# Altium schematic symbol library Regulator.SchLib: 250 symbols (part 5 of 6)
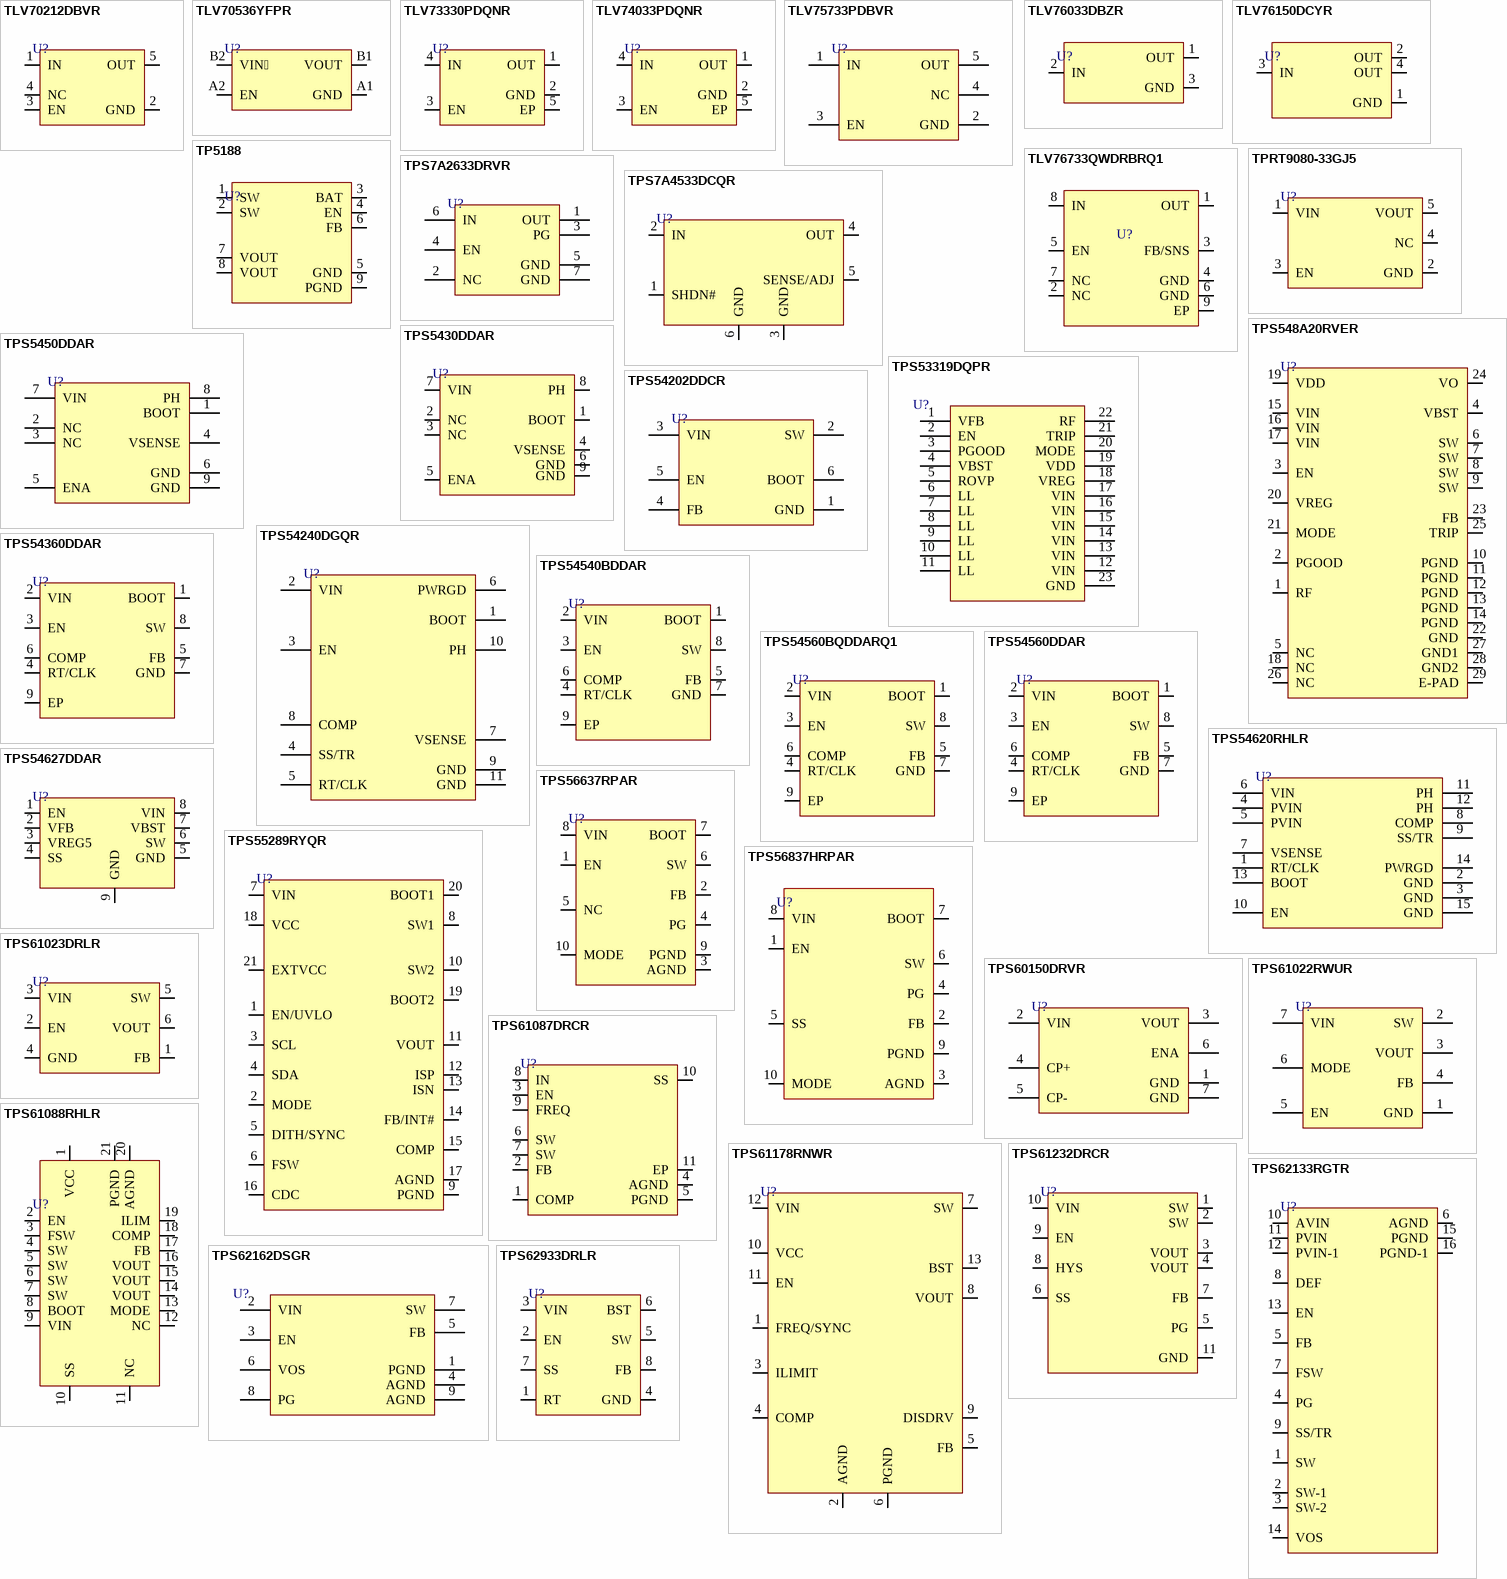
[diagram p10: symbols TLV70212DBVR to TPS62933DRLR]

## TPS7A4533DCQR
designator U?
IC REG LINEAR 3.3V 1.5A SOT223-6; Manufacturer: Texas Instruments; Manufacturer Part Number: TPS7A4533DCQR; Dropout Voltage: 300mV; Number of Outputs: 1; Max Supply Voltage: 20V; Min Input Voltage: 2.1V; Min Current Limit: 1.6A; Input Bias Current: 1mA; Polarity: Positive; Accuracy: 1%; Output Type: Fixed; Supplier: Mouser; LCSC Part Number: 595-TPS7A4533DCQR; RoHS: Yes; Item Type: IC; Stock: 854; Pricing: 1=3.2, 10=2.35, 50=2.35, 100=2.14, 1000=2, 10000=1.87 (USD); Case/Package: SOT-223-6; Pins: 6; Min Operating Temperature: -40°C; Max Operating Temperature: 125°C; Output Voltage: 3.3V; Package Quantity: 2500; Packaging: Tape and Reel; Output Current: 1.5A; Max Output current: 1.5A; Number of Regulators: 1; Quiescent Current: 1mA; Max Output Voltage: 3.3V; Min Output Voltage: 3.3V; Series: -; Radiation Hardening: No; Lead Free: Lead Free; RoHS Compliant: Yes; ComponentLink1URL: https://datasheet.ciiva.com/2046/tps7a4515-2046240.pdf?src-supplier=Digikey; ComponentLink1Description: https://datasheet.ciiva.com/2046/tps7a4515-2046240.pdf?src-supplier=Digikey; ComponentLink2URL: https://datasheet.ciiva.com/29569/tps7a4501-29569717.pdf?src-supplier=Digikey; ComponentLink2Description: https://datasheet.ciiva.com/29569/tps7a4501-29569717.pdf?src-supplier=Digikey; ComponentLink3URL: https://datasheet.ciiva.com/29569/tps7a4501-29569718.pdf?src-supplier=Digikey; ComponentLink3Description: https://datasheet.ciiva.com/29569/tps7a4501-29569718.pdf?src-supplier=Digikey; ComponentLink4URL: https://datasheet.ciiva.com/29569/tps7a4501-29569719.pdf?src-supplier=Digikey; ComponentLink4Description: https://datasheet.ciiva.com/29569/tps7a4501-29569719.pdf?src-supplier=Digikey
footprint SOT-223-6_
pins: 1 SHDN#, 2 IN, 3 GND, 4 OUT, 5 SENSE/ADJ, 6 GND

## TPS548A20RVER
designator U?
IC REG BUCK ADJ 15A 28VQFN; Manufacturer: Texas Instruments; Manufacturer Part Number: TPS548A20RVER; Package: VQFN-CLIP-28-EP(3.5x4.5); LCSC Part Number: C468255; ComponentLink1Description: LCSC; ComponentLink1URL: https://www.lcsc.com/product-detail/DC-DC-Converters_Texas-Instruments-TPS548A20RVER_C468255.html?s_z=n_TPS548A20RVER; Item Type: IC
footprint VQFN-CLIP-28-EP(3.5x4.5)*
pins: 1 RF, 2 PGOOD, 3 EN, 4 VBST, 5 NC, 6 SW, 7 SW, 8 SW, 9 SW, 10 PGND, 11 PGND, 12 PGND, 13 PGND, 14 PGND, 15 VIN, 16 VIN, 17 VIN, 18 NC, 19 VDD, 20 VREG, 21 MODE, 22 GND, 23 FB, 24 VO, 25 TRIP, 26 NC, 27 GND1, 28 GND2, 29 E-PAD

## TPS5430DDAR
designator U?
IC REG BUCK ADJ 3A 8SOPWRPAD; Manufacturer: Texas Instruments; Manufacturer Part Number: TPS5430DDAR; Number of Outputs: 1; Output Voltage: 31V; Min Input Voltage: 5.5V; Max Supply Voltage: 36V; Efficiency: 95%; Switching Frequency: 500kHz; Synchronous Rectifier: No; Quiescent Current: 3mA; Output Type: Adjustable; Min Output Voltage: 1.22V; Supplier 1: Mouser; RoHS: Yes; Category: Voltage Regulators - Switching; Stock 1: 22539; Pricing 1: 1=4.49, 10=4.03, 50=3.81, 100=3.3, 1000=2.4, 10000=2.31 (USD); Mounting Technology: Surface Mount; Case/Package: HSOP; Pins: 8; Weight: 0.00249oz; Min Operating Temperature: -40°C; Max Operating Temperature: 125°C; Packaging: Tape and Reel; Max Output current: 3A; Output Current: 3A; Package Quantity: 1; Operating Supply Voltage: 36V; Series: SWIFT™; Max Output Voltage: 31V; Length: 5mm; Width: 4mm; Height: 1.55mm; Radiation Hardening: No; Lead Free: Lead Free; RoHS Compliant: Yes; ComponentLink1URL: https://datasheet.ciiva.com/27052/1523997-27052321.pdf?src-supplier=Jameco; ComponentLink1Description: https://datasheet.ciiva.com/27052/1523997-27052321.pdf?src-supplier=Jameco; ComponentLink2URL: https://datasheet.ciiva.com/15113/getdatasheetpartid-214658-15113401.pdf?src-supplier=Verical; ComponentLink2Description: https://datasheet.ciiva.com/15113/getdatasheetpartid-214658-15113401.pdf?src-supplier=Verical; ComponentLink3URL: https://datasheet.ciiva.com/41462/001014839-da-01-en-ic-reg-buck-adj-3-tps5430ddar-soic-8-tid-41462684.pdf?src-supplier=Conrad; ComponentLink3Description: https://datasheet.ciiva.com/41462/001014839-da-01-en-ic-reg-buck-adj-3-tps5430ddar-soic-8-tid-41462684.pdf?src-supplier=Conrad; ComponentLink4URL: https://datasheet.ciiva.com/2035/tps5431-2035207.pdf?src-supplier=Digi-Key; ComponentLink4Description: https://datasheet.ciiva.com/2035/tps5431-2035207.pdf?src-supplier=Digi-Key; ComponentLink5URL: https://datasheet.ciiva.com/2035/tps5431-2035206.pdf?src-supplier=Digi-Key; ComponentLink5Description: https://datasheet.ciiva.com/2035/tps5431-2035206.pdf?src-supplier=Digi-Key; ComponentLink6URL: https://datasheet.ciiva.com/2035/tps5431-2035208.pdf?src-supplier=Digi-Key; ComponentLink6Description: https://datasheet.ciiva.com/2035/tps5431-2035208.pdf?src-supplier=Digi-Key; ComponentLink7URL: https://datasheet.ciiva.com/3220/tps5430-3220197.pdf?src-supplier=Avnet; ComponentLink7Description: https://datasheet.ciiva.com/3220/tps5430-3220197.pdf?src-supplier=Avnet; Supplier Part Number 1: 595-TPS5430DDAR; LCSC Part Number: C9864; Item Type: IC
footprint 8-SOIC-EP
pins: 1 BOOT, 2 NC, 3 NC, 4 VSENSE, 5 ENA, 6 GND, 7 VIN, 8 PH, 9 GND

## TPS5450DDAR
designator U?
IC REG BUCK ADJUSTABLE 5A 8SOPWR; Manufacturer: Texas Instruments; Manufacturer Part Number: TPS5450DDAR; Min Input Voltage: 5.5V; Number of Outputs: 1; Output Voltage: 31V; Max Supply Voltage: 36V; Switching Frequency: 500kHz; Synchronous Rectifier: No; Quiescent Current: 3mA; Min Output Voltage: 1.22V; Efficiency: 90%; Supplier 1: Mouser; RoHS: Yes; Category: Voltage Regulators - Switching; Stock 1: 10304; Pricing 1: 1=5.44, 10=4.88, 50=4.62, 100=4, 1000=2.9, 10000=2.8 (USD); Mounting Technology: Surface Mount; Case/Package: HSOP; Pins: 8; Weight: 0.00249oz; Min Operating Temperature: -40°C; Max Operating Temperature: 125°C; Packaging: Tape and Reel; Package Quantity: 1; Max Output current: 5A; Output Current: 5A; Max Output Voltage: 31V; Operating Supply Voltage: 36V; Output Type: Adjustable; Series: SWIFT™; Length: 5mm; Width: 4mm; Height: 1.55mm; Radiation Hardening: No; Lead Free: Lead Free; RoHS Compliant: Yes; ComponentLink1URL: https://datasheet.ciiva.com/15113/getdatasheetpartid-172659-15113657.pdf?src-supplier=Verical; ComponentLink1Description: https://datasheet.ciiva.com/15113/getdatasheetpartid-172659-15113657.pdf?src-supplier=Verical; ComponentLink2URL: https://datasheet.ciiva.com/2035/tps5450-2035367.pdf?src-supplier=Digi-Key; ComponentLink2Description: https://datasheet.ciiva.com/2035/tps5450-2035367.pdf?src-supplier=Digi-Key; ComponentLink3URL: https://datasheet.ciiva.com/2035/tps5450-2035366.pdf?src-supplier=Digi-Key; ComponentLink3Description: https://datasheet.ciiva.com/2035/tps5450-2035366.pdf?src-supplier=Digi-Key; ComponentLink4URL: https://datasheet.ciiva.com/2035/tps5450-2035368.pdf?src-supplier=Digi-Key; ComponentLink4Description: https://datasheet.ciiva.com/2035/tps5450-2035368.pdf?src-supplier=Digi-Key; ComponentLink5URL: https://datasheet.ciiva.com/14303/tps5450-14303689.pdf?src-supplier=Avnet; ComponentLink5Description: https://datasheet.ciiva.com/14303/tps5450-14303689.pdf?src-supplier=Avnet; ComponentLink6URL: https://datasheet.ciiva.com/3220/tps5450-3220230.pdf?src-supplier=Avnet; ComponentLink6Description: https://datasheet.ciiva.com/3220/tps5450-3220230.pdf?src-supplier=Avnet; Supplier Part Number 1: 595-TPS5450DDAR; LCSC Part Number: C114425; Item type: IC
footprint 8-SO-EP_
pins: 1 BOOT, 2 NC, 3 NC, 4 VSENSE, 5 ENA, 6 GND, 7 VIN, 8 PH, 9 GND

## TPS53319DQPR
designator U?
IC REG BUCK ADJUSTABLE 14A 22SON; Manufacturer: Texas Instruments; Manufacturer Part Number: TPS53319DQPR; Output Voltage: 5.5V; Switching Frequency: 1MHz; Min Input Voltage: 1.5V; Max Input Voltage: 22V; Number of Outputs: 1; Synchronous Rectifier: Yes; Min Output Voltage: 600mV; Quiescent Current: 320uA; Output Configuration: Positive; Efficiency: 91%; Supplier 1: Newark; RoHS: Yes; Category: Voltage Regulators - Switching; Mount: Surface Mount; Case/Package: SON; Number of Pins: 22; Contact Plating: Gold; Min Operating Temperature: -40°C; Max Operating Temperature: 85°C; Output Current: 14A; Package Quantity: 2500; Series: D-CAP™, Eco-Mode™; Packaging: Tape and Reel; Max Output Voltage: 5.5V; Output Type: Adjustable; Max Output Current: 14A; Radiation Hardening: No; Lead Free: Contains Lead; RoHS Compliant: Yes; ComponentLink1URL: https://datasheet.ciiva.com/6605/tps53318-6605682.pdf?src-supplier=Digi-Key; ComponentLink1Description: https://datasheet.ciiva.com/6605/tps53318-6605682.pdf?src-supplier=Digi-Key; ComponentLink2Description: LCSC; ComponentLink2URL: https://www.lcsc.com/product-detail/DC-DC-Converters_Texas-Instruments-TPS53319DQPR_C181971.html; LCSC Part Number: C181971; Item Type: IC
footprint 22-LSON-CLIP (6x5)
pins: 1 VFB, 2 EN, 3 PGOOD, 4 VBST, 5 ROVP, 6 LL, 7 LL, 8 LL, 9 LL, 10 LL, 11 LL, 12 VIN, 13 VIN, 14 VIN, 15 VIN, 16 VIN, 17 VIN, 18 VREG, 19 VDD, 20 MODE, 21 TRIP, 22 RF, 23 GND

## TPS54202DDCR
designator U?
IC REG BUCK ADJ 2A SOT23; Manufacturer: Texas Instruments; Manufacturer Part Number: TPS54202DDCR; Manufacturer Lifecycle Status: ACTIVE; Max Duty Cycle: 100%; Max Supply Voltage: 28V; Max Junction Temperature (Tj): 125°C; Min Input Voltage: 4.5V; Min Output Voltage: 596mV; Nominal Supply Current: 45µA; Number of Channels: 1; Output Configuration: Positive; Output Type: Adjustable; Quiescent Current: 40µA; Switching Frequency: 500kHz; Synchronous Rectifier: Yes; Supplier: DigiKey; Supplier Part Number: 296-TPS54202DDCRCT-ND; RoHS: Compliant; Item Type: IC; Stock: 4194; Pricing: 1=1.17, 10=0.844, 25=0.7636, 100=0.6746, 250=0.63224, 500=0.60672, 1000=0.5857 (USD); Case/Package: SOT-23-6; Height: 1.1mm; Lead Free: Lead Free; Length: 2.9mm; Lifecycle Status: Production; Max Operating Temperature: 125°C; Max Output Voltage: 28V; Min Operating Temperature: -40°C; Min Supply Voltage: 4.5V; Mounting Technology: Surface Mount; Number of Outputs: 1; Pins: 6; Output Current: 2A; Schedule B: 8542390000, 8542390000|8542390000|8542390000|8542390000|8542390000; Thickness: 870µm; Topology: Buck; Width: 1.6mm; ComponentLink1URL: https://sigma.octopart.com:443/180581133/technical_drawing/Texas-Instruments-TPS54202DDCR.pdf?src-supplier=Texas+Instruments; ComponentLink1Description: https://sigma.octopart.com:443/180581133/technical_drawing/Texas-Instruments-TPS54202DDCR.pdf?src-supplier=Texas+Instruments; ComponentLink2URL: https://octopart.com:443/opatz8j6/c1?t=FAFTCw9MUHEpg05pud1ULAyccV128Rvs4kpgtbIHJK4QnZYUn5DIlTqILZCRn3OGKuIK2OAwsfJUaHqp_uWt2XWRUIWZjvnlSsBH8aSBLHpCm5pUgjYkmYK7aQZ1tKHDT4GDuf94S2TW-N1iaYVMc29JfnO6Y5xBGsqSuWmXlwMR5Pf7MLFg3XCbpaNjJfeHg6VBfvWZIp62-z7iIfeN-xLXbqauIUvBeZHqQTWCwBkKVxqgCgQQwDnJZoJ9yjTomjI04wnmJO18egisqEyqoosAlQPDDAhdHAxkSRGJnBHeBom8jBmTnp4C8Wpyey22POweYbBp_aNhdPUtTJQM6gKaI5oNKWbufVAnfV7bde1UKHIaUN1cgnNmWHvEiIDYXKFykrh0&src-supplier=Texas+Instruments; ComponentLink2Description: https://octopart.com:443/opatz8j6/c1?t=FAFTCw9MUHEpg05pud1ULAyccV128Rvs4kpgtbIHJK4QnZYUn5DIlTqILZCRn3OGKuIK2OAwsfJUaHqp_uWt2XWRUIWZjvnlSsBH8aSBLHpCm5pUgjYkmYK7aQZ1tKHDT4GDuf94S2TW-N1iaYVMc29JfnO6Y5xBGsqSuWmXlwMR5Pf7MLFg3XCbpaNjJfeHg6VBfvWZIp62-z7iIfeN-xLXbqauIUvBeZHqQTWCwBkKVxqgCgQQwDnJZoJ9yjTomjI04wnmJO18egisqEyqoosAlQPDDAhdHAxkSRGJnBHeBom8jBmTnp4C8Wpyey22POweYbBp_aNhdPUtTJQM6gKaI5oNKWbufVAnfV7bde1UKHIaUN1cgnNmWHvEiIDYXKFykrh0&src-supplier=Texas+Instruments; ComponentLink3URL: https://sigma.octopart.com:443/179311906/technical_drawing/Texas-Instruments-TPS54202DDCR.pdf?src-supplier=Texas+Instruments; ComponentLink3Description: https://sigma.octopart.com:443/179311906/technical_drawing/Texas-Instruments-TPS54202DDCR.pdf?src-supplier=Texas+Instruments; ComponentLink4URL: https://sigma.octopart.com:443/159779760/technical_drawing/Texas-Instruments-TPS54202DDCR.pdf?src-supplier=Texas+Instruments; ComponentLink4Description: https://sigma.octopart.com:443/159779760/technical_drawing/Texas-Instruments-TPS54202DDCR.pdf?src-supplier=Texas+Instruments; ComponentLink5URL: https://sigma.octopart.com:443/149167535/technical_drawing/Texas-Instruments-TPS54202DDCR.pdf?src-supplier=Texas+Instruments; ComponentLink5Description: https://sigma.octopart.com:443/149167535/technical_drawing/Texas-Instruments-TPS54202DDCR.pdf?src-supplier=Texas+Instruments; ComponentLink6URL: https://sigma.octopart.com:443/49250152/technical_drawing/Texas-Instruments-TPS54202DDCR.pdf?src-supplier=Texas+Instruments; ComponentLink6Description: https://sigma.octopart.com:443/49250152/technical_drawing/Texas-Instruments-TPS54202DDCR.pdf?src-supplier=Texas+Instruments; ComponentLink7URL: https://datasheet.octopart.com:443/TPS54202DDCR-Texas-Instruments-datasheet-100480396.pdf?src-supplier=Upverter; ComponentLink7Description: https://datasheet.octopart.com:443/TPS54202DDCR-Texas-Instruments-datasheet-100480396.pdf?src-supplier=Upverter; ComponentLink8URL: https://datasheet.octopart.com:443/TPS54202DDCR-Texas-Instruments-datasheet-165804749.pdf?src-supplier=LCSC; ComponentLink8Description: https://datasheet.octopart.com:443/TPS54202DDCR-Texas-Instruments-datasheet-165804749.pdf?src-supplier=LCSC; ComponentLink9URL: https://datasheet.octopart.com:443/TPS54202DDCR-Texas-Instruments-datasheet-159118069.pdf?src-supplier=LCSC; ComponentLink9Description: https://datasheet.octopart.com:443/TPS54202DDCR-Texas-Instruments-datasheet-159118069.pdf?src-supplier=LCSC; ComponentLink10URL: https://datasheet.octopart.com:443/TPS54202DDCR-Texas-Instruments-datasheet-142296497.pdf?src-supplier=Arrow.cn; ComponentLink10Description: https://datasheet.octopart.com:443/TPS54202DDCR-Texas-Instruments-datasheet-142296497.pdf?src-supplier=Arrow.cn; ComponentLink11URL: http://sigma.octopart.com:80/conflict_mineral_statement/Texas-Instruments-company-63.pdf?src-supplier=Compliance+Statements; ComponentLink11Description: http://sigma.octopart.com:80/conflict_mineral_statement/Texas-Instruments-company-63.pdf?src-supplier=Compliance+Statements; ComponentLink12URL: http://sigma.octopart.com:80/reach_statement/Texas-Instruments-company-64.pdf?src-supplier=Compliance+Statements; ComponentLink12Description: http://sigma.octopart.com:80/reach_statement/Texas-Instruments-company-64.pdf?src-supplier=Compliance+Statements
footprint SOT-23-6 THIN
pins: 1 GND, 2 SW, 3 VIN, 4 FB, 5 EN, 6 BOOT

## TPS54240DGQR
designator U?
IC REG BCK SPLIT RAIL ADJ 10MSOP; Manufacturer: Texas Instruments; Manufacturer Part Number: TPS54240DGQR; Switching Frequency: 2.5MHz; Output Voltage: 39V; Output Current: 2.5A; Number of Outputs: 1; Max Supply Voltage: 42V; Min Input Voltage: 3.5V; Synchronous Rectifier: No; Min Output Voltage: 800mV; Quiescent Current: 138uA; Topology: Buck-Boost; Output Type: Adjustable; Supplier 1: Digi-Key; RoHS: Yes; Category: Voltage Regulators - Switching; Pricing 1: 1=3.26000, 10=2.93100, 25=2.77120, 100=2.40190, 250=2.27868, 500=2.04466, 1000=1.74300 (USD); Case/Package: HVSSOP; Pins: 10; Contact Plating: Gold; Min Operating Temperature: -40°C; Max Operating Temperature: 125°C; Packaging: Tape and Reel; Package Quantity: 1; Max Output current: 2.5A; Max Output Voltage: 39V; Series: SWIFT™, Eco-Mode™; Min Supply Voltage: 3.5V; Operating Supply Voltage: 42V; Length: 3.1mm; Width: 3.1mm; Height: 0.95mm; Radiation Hardening: No; Reach SVHC Compliant: Yes; Lead Free: Lead Free; RoHS Compliant: Yes; ComponentLink1URL: https://datasheet.ciiva.com/2026/tps54240-2026016.pdf?src-supplier=Digi-Key; ComponentLink1Description: https://datasheet.ciiva.com/2026/tps54240-2026016.pdf?src-supplier=Digi-Key; ComponentLink2URL: https://datasheet.ciiva.com/41462/001014834-da-01-en-ic-reg-buck-ad-tps54240dgqr-vssop-10-tid-41462681.pdf?src-supplier=Conrad; ComponentLink2Description: https://datasheet.ciiva.com/41462/001014834-da-01-en-ic-reg-buck-ad-tps54240dgqr-vssop-10-tid-41462681.pdf?src-supplier=Conrad; ComponentLink3URL: https://datasheet.ciiva.com/2026/tps54240-2026015.pdf?src-supplier=Digi-Key; ComponentLink3Description: https://datasheet.ciiva.com/2026/tps54240-2026015.pdf?src-supplier=Digi-Key; ComponentLink4URL: https://datasheet.ciiva.com/2026/tps54240-2026014.pdf?src-supplier=Digi-Key; ComponentLink4Description: https://datasheet.ciiva.com/2026/tps54240-2026014.pdf?src-supplier=Digi-Key; ComponentLink5URL: https://datasheet.ciiva.com/14378/slvsaa6-14378059.pdf?src-supplier=Avnet; ComponentLink5Description: https://datasheet.ciiva.com/14378/slvsaa6-14378059.pdf?src-supplier=Avnet; Supplier Part Number 1: 296-27414-1-ND; LCSC Part Number: C53213; Item Type: IC
footprint 10-HVSSOP - New (IC BATT CHG LI-ION 1CELL 10MSOP)
pins: 1 BOOT, 2 VIN, 3 EN, 4 SS/TR, 5 RT/CLK, 6 PWRGD, 7 VSENSE, 8 COMP, 9 GND, 10 PH, 11 GND

## TPS54360DDAR
designator U?
IC REG BCK SPLIT RAIL ADJ 8SOPWR; Manufacturer: Texas Instruments; Manufacturer Part Number: TPS54360DDAR; Supplier: Mouser; LCSC Part Number: C44377; RoHS: Yes; Item Type: IC; Stock: 2440; Pricing: 1=4.37, 10=3.05, 50=3.05, 100=2.76, 1000=2.47, 10000=2.31 (USD); ComponentLink1URL: https://datasheet.ciiva.com/12221/tps54360-109421-12221526.pdf?src-supplier=Mouser; ComponentLink1Description: https://datasheet.ciiva.com/12221/tps54360-109421-12221526.pdf?src-supplier=Mouser; ComponentLink2URL: https://datasheet.ciiva.com/14833/2976tps54360-14833745.pdf?src-supplier=Arrow+Electronics; ComponentLink2Description: https://datasheet.ciiva.com/14833/2976tps54360-14833745.pdf?src-supplier=Arrow+Electronics; ComponentLink3URL: https://datasheet.ciiva.com/14377/tps54360-14377976.pdf?src-supplier=Avnet; ComponentLink3Description: https://datasheet.ciiva.com/14377/tps54360-14377976.pdf?src-supplier=Avnet; ComponentLink4URL: https://datasheet.ciiva.com/41798/tps54360-41798794.pdf?src-supplier=Digikey; ComponentLink4Description: https://datasheet.ciiva.com/41798/tps54360-41798794.pdf?src-supplier=Digikey
footprint 8-SO PowerPad
pins: 1 BOOT, 2 VIN, 3 EN, 4 RT/CLK, 5 FB, 6 COMP, 7 GND, 8 SW, 9 EP

## TPS54540BDDAR
designator U?
IC REG BCK SPLIT RL ADJ 8SOPWR; Manufacturer: Texas Instruments; Manufacturer Part Number: TPS54540BDDAR; Package: SO-8; LCSC Part Number: C1850368; Item Type: IC; ComponentLink1Description: LCSC; ComponentLink1URL: https://www.lcsc.com/product-detail/DC-DC-Converters_Texas-Instruments-TPS54540BDDAR_C1850368.html
footprint 8-SO PowerPad
pins: 1 BOOT, 2 VIN, 3 EN, 4 RT/CLK, 5 FB, 6 COMP, 7 GND, 8 SW, 9 EP

## TPS54560BQDDARQ1
designator U?
IC REG BCK SPLIT RAIL ADJ 8SOPWR; Manufacturer: Texas Instruments; Manufacturer Part Number: TPS54560BQDDARQ1; Max Supply Voltage: 60V; Min Supply Voltage: 4.5V; Nominal Supply Current: 146uA; Supplier: Mouser; Supplier Part Number: 595-TPS54560BQDDARQ1; RoHS: Yes; Item Type: IC; Stock: 1171; Pricing: 1=6.41, 10=5.44, 50=5.44, 100=4.7, 1000=3.4, 10000=3.29 (USD); Length: 4.89mm; Width: 3.9mm; Height: 1.7mm; Thickness: 1.48mm; ComponentLink1URL: http://www.ti.com/lit/ds/symlink/tps54560b-q1.pdf?src-supplier=Digikey; ComponentLink1Description: http://www.ti.com/lit/ds/symlink/tps54560b-q1.pdf?src-supplier=Digikey; LCSC Part Number: C2072188
footprint 8-SO PowerPad
pins: 1 BOOT, 2 VIN, 3 EN, 4 RT/CLK, 5 FB, 6 COMP, 7 GND, 8 SW, 9 EP

## TPS54560DDAR
designator U?
IC REG BCK SPLIT RAIL ADJ 8SOPWR; Manufacturer: Texas Instruments; Manufacturer Part Number: TPS54560DDAR; Item Type: Voltage Regulators - Switching; Supplier: Mouser; Supplier Part Number: 595-TPS54560DDAR; RoHS: Yes; Stock: 12707; Pricing: 1=4.48, 10=3.93, 50=3.93, 100=3.6, 1000=2.75, 10000=2.67 (USD); ComponentLink1URL: https://datasheet.ciiva.com/15082/tps54560-15082015.pdf?src-supplier=Digikey; ComponentLink1Description: https://datasheet.ciiva.com/15082/tps54560-15082015.pdf?src-supplier=Digikey; ComponentLink2URL: https://datasheet.ciiva.com/30031/tps54560-30031578.pdf?src-supplier=Avnet; ComponentLink2Description: https://datasheet.ciiva.com/30031/tps54560-30031578.pdf?src-supplier=Avnet; ComponentLink3URL: https://datasheet.ciiva.com/29739/tps54560-29739549.pdf?src-supplier=Digikey; ComponentLink3Description: https://datasheet.ciiva.com/29739/tps54560-29739549.pdf?src-supplier=Digikey; LCSC Part Number: C31966
footprint SOIC-8-EP
pins: 1 BOOT, 2 VIN, 3 EN, 4 RT/CLK, 5 FB, 6 COMP, 7 GND, 8 SW, 9 EP

## TPS54620RHLR
designator U?
IC REG BUCK ADJUSTABLE 6A 14VQFN; Manufacturer: Texas Instruments; Manufacturer Part Number: TPS54620RHLR; Number of Outputs: 1; Output Voltage: 15V; Min Input Voltage: 1.6V; Max Input Voltage: 17V; Switching Frequency: 1.6MHz; Min Supply Voltage: 4.5V; Synchronous Rectifier: Yes; Min Output Voltage: 800mV; Quiescent Current: 600uA; Supplier 1: Digi-Key; RoHS: Yes; Category: Voltage Regulators - Switching; Pricing 1: 1=5.80000, 10=5.20700, 25=4.92280, 100=4.26630, 250=4.04752, 500=3.63182, 1000=3.61200 (USD); Mount: Surface Mount; Case/Package: QFN; Number of Pins: 14; Contact Plating: Gold; Min Operating Temperature: -40°C; Max Operating Temperature: 150°C; Max Output Current: 6A; Operating Supply Voltage: 17V; Output Current: 6A; Packaging: Tape and Reel; Package Quantity: 3000; Max Output Voltage: 15V; Output Type: Adjustable; Series: SWIFT™; Length: 3.65mm; Width: 3.65mm; Height: 0.95mm; Radiation Hardening: No; REACH SVHC: No SVHC; Lead Free: Lead Free; RoHS Compliant: Yes; ComponentLink1URL: https://datasheet.ciiva.com/2026/tps54620-2026364.pdf?src-supplier=Digi-Key; ComponentLink1Description: https://datasheet.ciiva.com/2026/tps54620-2026364.pdf?src-supplier=Digi-Key; ComponentLink2URL: https://datasheet.ciiva.com/22716/1781687-22716300.pdf?src-supplier=Element14; ComponentLink2Description: https://datasheet.ciiva.com/22716/1781687-22716300.pdf?src-supplier=Element14; ComponentLink3URL: https://datasheet.ciiva.com/2026/tps54620-2026365.pdf?src-supplier=Digi-Key; ComponentLink3Description: https://datasheet.ciiva.com/2026/tps54620-2026365.pdf?src-supplier=Digi-Key; ComponentLink4URL: https://datasheet.ciiva.com/26101/tps54620-26101515.pdf?src-supplier=Avnet+Europe; ComponentLink4Description: https://datasheet.ciiva.com/26101/tps54620-26101515.pdf?src-supplier=Avnet+Europe; ComponentLink5URL: https://datasheet.ciiva.com/3221/tps54620-3221357.pdf?src-supplier=Avnet; ComponentLink5Description: https://datasheet.ciiva.com/3221/tps54620-3221357.pdf?src-supplier=Avnet; ComponentLink6URL: https://datasheet.ciiva.com/2026/tps54620-2026366.pdf?src-supplier=Digi-Key; ComponentLink6Description: https://datasheet.ciiva.com/2026/tps54620-2026366.pdf?src-supplier=Digi-Key; Supplier Part Number 1: 296-28831-1-ND; LCSC Part Number: C263274; Item Type: IC
footprint 14-VQFN (3.5x3.5)_
pins: 1 RT/CLK, 2 GND, 3 GND, 4 PVIN, 5 PVIN, 6 VIN, 7 VSENSE, 8 COMP, 9 SS/TR, 10 EN, 11 PH, 12 PH, 13 BOOT, 14 PWRGD, 15 GND

## TPS54627DDAR
designator U?
IC REG BUCK ADJ 6A 8SOPWR; Manufacturer: Texas Instruments; Manufacturer Part Number: TPS54627DDAR; Supplier: Mouser; Supplier Part Number: 595-TPS54627DDAR; RoHS: Yes; Category: Voltage Regulators - Switching; Stock: 1189; Pricing: 1=4.39, 10=3.73, 50=3.73, 100=3.23, 1000=2.32, 10000=2.19 (USD); ComponentLink1URL: https://datasheet.ciiva.com/24017/slvsbw6a-316903-24017122.pdf?src-supplier=Mouser; ComponentLink1Description: https://datasheet.ciiva.com/24017/slvsbw6a-316903-24017122.pdf?src-supplier=Mouser; ComponentLink2URL: https://datasheet.ciiva.com/18551/tps54627-18551188.pdf?src-supplier=Digi-Key; ComponentLink2Description: https://datasheet.ciiva.com/18551/tps54627-18551188.pdf?src-supplier=Digi-Key; ComponentLink3URL: https://datasheet.ciiva.com/29885/tps54627-29885831.pdf?src-supplier=Avnet; ComponentLink3Description: https://datasheet.ciiva.com/29885/tps54627-29885831.pdf?src-supplier=Avnet; LCSC Part Number: C398919; Item Type: IC
footprint 8-SO-EP_
pins: 1 EN, 2 VFB, 3 VREG5, 4 SS, 5 GND, 6 SW, 7 VBST, 8 VIN, 9 GND

## TPS55289RYQR
designator U?
IC REG BUCK BST ADJ 6.35A 21VQFN; Manufacturer: Texas Instruments; Manufacturer Part Number: TPS55289RYQR; Topology: 6153TopologyType; Supplier: Mouser; LCSC Part Number: C5942077; RoHS: No; Item Type: IC; Stock: 13087; Pricing: 1=6.45, 10=4.74, 50=4.74, 100=4.32, 1000=4.03, 10000=4.03 (USD); ComponentLink1Description: LCSC; ComponentLink1URL: https://www.lcsc.com/product-detail/DC-DC-Converters_Texas-Instruments-TPS55289RYQR_C5942077.html?s_z=n_TPS55289RYQR
footprint VQFN-HR-21(3x5)
pins: 1 EN/UVLO, 2 MODE, 3 SCL, 4 SDA, 5 DITH/SYNC, 6 FSW, 7 VIN, 8 SW1, 9 PGND, 10 SW2, 11 VOUT, 12 ISP, 13 ISN, 14 FB/INT#, 15 COMP, 16 CDC, 17 AGND, 18 VCC, 19 BOOT2, 20 BOOT1, 21 EXTVCC

## TPS56637RPAR
designator U?
IC REG BUCK ADJ 6A 10VQFN; Manufacturer: Texas Instruments; Manufacturer Part Number: TPS56637RPAR; Output Type: Adjustable; Output Configuration: Positive; Number of Outputs: 1; Min Input Voltage: 4.5V; Max Supply Voltage: 28V; Min Output Voltage: 600mV; Max Output Voltage: 13V; Switching Frequency: 500kHz; Synchronous Rectifier: Yes; Supplier: Digikey; Supplier Part Number: 296-TPS56637RPARCT-ND; RoHS: Yes; Category: Voltage Regulators - Switching; Stock: 17824; Pricing: 1=3.71, 10=3.332, 25=3.1496, 100=2.7297, 250=2.58976, 500=2.32376, 1000=1.9598 (USD); Mounting Technology: Surface Mount; Case/Package: VQFN; Pins: 10; Min Operating Temperature: -40°C; Max Operating Temperature: 150°C; Series: -; Output Current: 6A; ComponentLink1URL: http://www.ti.com/general/docs/suppproductinfo.tsp?distId=10&amp;gotoUrl=http%3A%2F%2Fwww.ti.com%2Flit%2Fgpn%2Ftps56637&src-supplier=Digikey; ComponentLink1Description: http://www.ti.com/general/docs/suppproductinfo.tsp?distId=10&amp;gotoUrl=http%3A%2F%2Fwww.ti.com%2Flit%2Fgpn%2Ftps56637&src-supplier=Digikey; LCSC Part Number: C841386; Item Type: IC
footprint 10-VQFN-HR (3x3)
pins: 1 EN, 2 FB, 3 AGND, 4 PG, 5 NC, 6 SW, 7 BOOT, 8 VIN, 9 PGND, 10 MODE

## TPS56837HRPAR
designator U?
4.5V TO 28V INPUT, 8A SYNCHRONOU; Manufacturer: Texas Instruments; Manufacturer Part Number: TPS56837HRPAR; Item Type: IC; Supplier: Mouser; Supplier Part Number: 595-TPS56837HRPAR; RoHS: No; Stock: 4990; Pricing: 1=2.74, 10=2.46, 50=2.46, 100=1.97, 1000=1.34, 10000=1.2 (USD); Pins: 10; Length: 3mm; Width: 3mm; Height: 1mm; Thickness: 900um
footprint 10-VQFN-HR (3x3)
pins: 1 EN, 2 FB, 3 AGND, 4 PG, 5 SS, 6 SW, 7 BOOT, 8 VIN, 9 PGND, 10 MODE

## TPS60150DRVR
designator U?
IC REG CHARGE PUMP 5V 140MA 6SON; Manufacturer: Texas Instruments; Manufacturer Part Number: TPS60150DRVR; Number of Outputs: 1; Max Input Voltage: 5.5V; Min Input Voltage: 2.7V; Switching Frequency: 1.5MHz; Synchronous Rectifier: No; Min Output Voltage: 4.8V; Quiescent Current: 4.7mA; Max Output Voltage: 5.2V; Output Type: Fixed; Nominal Supply Current: 90uA; Topology: Boost; Supplier 1: Digi-Key; RoHS: Yes; Category: Voltage Regulators - Switching; Pricing 1: 1=1.69000, 10=1.51400, 25=1.42840, 100=1.21700, 250=1.14268, 500=0.99984, 1000=0.94325 (USD); Case/Package: SON; Number of Pins: 6; Contact Plating: Gold; Min Operating Temperature: -40°C; Max Operating Temperature: 85°C; Packaging: Tape and Reel; Output Voltage: 5V; Output Current: 140mA; Package Quantity: 1; Max Output Current: 140mA; Series: -; Max Supply Voltage: 5.5V; Min Supply Voltage: 2.7V; Nominal Output Voltage: 5V; Supply Current: 90uA; Radiation Hardening: No; REACH SVHC: No SVHC; Lead Free: Lead Free; RoHS Compliant: Yes; ComponentLink1URL: https://datasheet.ciiva.com/15114/getdatasheetpartid-358100-15114131.pdf?src-supplier=Verical; ComponentLink1Description: https://datasheet.ciiva.com/15114/getdatasheetpartid-358100-15114131.pdf?src-supplier=Verical; ComponentLink2URL: https://datasheet.ciiva.com/4874/slvs888b-120916-4874885.pdf?src-supplier=Mouser; ComponentLink2Description: https://datasheet.ciiva.com/4874/slvs888b-120916-4874885.pdf?src-supplier=Mouser; ComponentLink3URL: https://datasheet.ciiva.com/26902/tps60150drvr-26902693.pdf?src-supplier=IIIC; ComponentLink3Description: https://datasheet.ciiva.com/26902/tps60150drvr-26902693.pdf?src-supplier=IIIC; ComponentLink4URL: https://datasheet.ciiva.com/41462/001014874-da-01-en-ic-reg-switched-tps60150drvr-wson-6-tid-41462718.pdf?src-supplier=Conrad; ComponentLink4Description: https://datasheet.ciiva.com/41462/001014874-da-01-en-ic-reg-switched-tps60150drvr-wson-6-tid-41462718.pdf?src-supplier=Conrad; ComponentLink5URL: https://datasheet.ciiva.com/22669/1828381-22669637.pdf?src-supplier=Element14; ComponentLink5Description: https://datasheet.ciiva.com/22669/1828381-22669637.pdf?src-supplier=Element14; ComponentLink6URL: https://datasheet.ciiva.com/2025/tps60150-2025302.pdf?src-supplier=Digi-Key; ComponentLink6Description: https://datasheet.ciiva.com/2025/tps60150-2025302.pdf?src-supplier=Digi-Key; ComponentLink7URL: https://datasheet.ciiva.com/2025/tps60150-2025303.pdf?src-supplier=Digi-Key; ComponentLink7Description: https://datasheet.ciiva.com/2025/tps60150-2025303.pdf?src-supplier=Digi-Key; ComponentLink8URL: https://datasheet.ciiva.com/2025/tps60150-2025304.pdf?src-supplier=Digi-Key; ComponentLink8Description: https://datasheet.ciiva.com/2025/tps60150-2025304.pdf?src-supplier=Digi-Key; ComponentLink9URL: https://datasheet.ciiva.com/46382/1828381-46382472.pdf?src-supplier=Element14; ComponentLink9Description: https://datasheet.ciiva.com/46382/1828381-46382472.pdf?src-supplier=Element14; ComponentLink10URL: https://datasheet.ciiva.com/3215/tps60150-3215851.pdf?src-supplier=Avnet; ComponentLink10Description: https://datasheet.ciiva.com/3215/tps60150-3215851.pdf?src-supplier=Avnet; ComponentLink11URL: https://datasheet.ciiva.com/14320/tps60150-14320303.pdf?src-supplier=Avnet; ComponentLink11Description: https://datasheet.ciiva.com/14320/tps60150-14320303.pdf?src-supplier=Avnet; Supplier Part Number 1: 296-24054-6-ND; LCSC Part Number: C182429; Item Type: IC
footprint 6-WSON (2x2)
pins: 1 GND, 2 VIN, 3 VOUT, 4 CP+, 5 CP-, 6 ENA, 7 GND

## TPS61022RWUR
designator U?
8-A boost converter with 0.5-V ultra-low input voltage 7-VQFN-HR -40 to 125; Manufacturer: Texas Instruments; Manufacturer Part Number: TPS61022RWUR; Item Type: IC; Supplier 1: Digi-Key; RoHS: Yes; Category: Voltage Regulators - Switching; Pricing 1: 1=1.88000, 10=1.68800, 25=1.59280, 100=1.35690, 250=1.27412, 500=1.11486, 1000=0.92374 (USD); Supplier Part Number 1: 296-TPS61022RWURDKR-ND; ComponentLink1Description: LCSC; ComponentLink1URL: https://www.lcsc.com/product-detail/DC-DC-Converters_Texas-Instruments-TPS61022RWUR_C915088.html; LCSC Part Number: C915088
footprint 7-VQFN-HR (2x2)
pins: 1 GND, 2 SW, 3 VOUT, 4 FB, 5 EN, 6 MODE, 7 VIN

## TPS61023DRLR
designator U?
IC REG BOOST ADJ 3A SOT563; Manufacturer: Texas Instruments; Manufacturer Part Number: TPS61023DRLR; Supplier: Mouser; LCSC Part Number: C919459; RoHS: Yes; Item Type: IC; Stock: 12004; Pricing: 1=0.89, 10=0.637, 50=0.574, 100=0.505, 1000=0.436, 10000=0.41 (USD); ComponentLink1URL: http://www.ti.com/general/docs/suppproductinfo.tsp?distId=10&amp;gotoUrl=http%3A%2F%2Fwww.ti.com%2Flit%2Fgpn%2Ftps61023&src-supplier=Digikey; ComponentLink1Description: http://www.ti.com/general/docs/suppproductinfo.tsp?distId=10&amp;gotoUrl=http%3A%2F%2Fwww.ti.com%2Flit%2Fgpn%2Ftps61023&src-supplier=Digikey
footprint SOT-563
pins: 1 FB, 2 EN, 3 VIN, 4 GND, 5 SW, 6 VOUT

## TPS61087DRCR
designator U?
IC REG BOOST ADJ 3.2A 10VSON; Manufacturer: Texas Instruments; Manufacturer Part Number: TPS61087DRCR; Number of Channels: 1NUMBER; Supplier: Mouser; LCSC Part Number: C112172; RoHS: Yes; Item Type: IC; Stock: 3146; Pricing: 1=2.05, 10=1.52, 50=1.38, 100=1.24, 1000=1.09, 10000=0.994 (USD); Length: 3mm; Height: 1mm; Thickness: 900um; ComponentLink1URL: https://datasheet.ciiva.com/15113/getdatasheetpartid-203567-15113836.pdf?src-supplier=Verical; ComponentLink1Description: https://datasheet.ciiva.com/15113/getdatasheetpartid-203567-15113836.pdf?src-supplier=Verical; ComponentLink2URL: https://datasheet.ciiva.com/2025/tps61087-2025888.pdf?src-supplier=Digikey; ComponentLink2Description: https://datasheet.ciiva.com/2025/tps61087-2025888.pdf?src-supplier=Digikey; ComponentLink3URL: https://datasheet.ciiva.com/41462/001014888-da-01-en-ic-reg-boost-ad-tps61087drcr-vson-10-tid-41462734.pdf?src-supplier=Conrad; ComponentLink3Description: https://datasheet.ciiva.com/41462/001014888-da-01-en-ic-reg-boost-ad-tps61087drcr-vson-10-tid-41462734.pdf?src-supplier=Conrad; ComponentLink4URL: https://datasheet.ciiva.com/2025/tps61087-2025889.pdf?src-supplier=Digikey; ComponentLink4Description: https://datasheet.ciiva.com/2025/tps61087-2025889.pdf?src-supplier=Digikey; ComponentLink5URL: https://datasheet.ciiva.com/2025/tps61087-2025890.pdf?src-supplier=Digikey; ComponentLink5Description: https://datasheet.ciiva.com/2025/tps61087-2025890.pdf?src-supplier=Digikey
footprint 10-VSON (3x3)
pins: 1 COMP, 2 FB, 3 EN, 4 AGND, 5 PGND, 6 SW, 7 SW, 8 IN, 9 FREQ, 10 SS, 11 EP

## TPS61088RHLR
designator U?
IC REG BOOST ADJ 10A 20VQFN; Manufacturer: Texas Instruments; Manufacturer Part Number: TPS61088RHLR; Number of Outputs: 1; Min Input Voltage: 2.7V; Max Supply Voltage: 12V; Min Output Voltage: 4.5V; Max Output Voltage: 12.6V; Switching Frequency: 2.2MHz; Synchronous Rectifier: Yes; Efficiency: 91%; Quiescent Current: 110uA; Output Type: Adjustable; Output Configuration: Positive; Supplier: Mouser; LCSC Part Number: C87357; RoHS: Yes; Item Type: IC; Stock: 3877; Pricing: 1=3.72, 10=2.51, 50=2.51, 100=2.14, 1000=1.49, 10000=1.32 (USD); Mounting Technology: Surface Mount; Case/Package: VQFN; Pins: 20; Min Operating Temperature: -40°C; Max Operating Temperature: 85°C; Packaging: Cut Tape; Output Current: 10A; Output Voltage: 12.6V; Max Output current: 10A; Topology: Boost; Operating Supply Voltage: 12V; Series: -; Lead Free: Lead Free; RoHS Compliant: Yes; ComponentLink1URL: http://www.ti.com/lit/ds/symlink/tps61088.pdf?src-supplier=Digikey; ComponentLink1Description: http://www.ti.com/lit/ds/symlink/tps61088.pdf?src-supplier=Digikey; ComponentLink2URL: http://www.ti.com/general/docs/lit/getliterature.tsp?genericPartNumber=TPS61088&&fileType=pdf&src-supplier=Avnet; ComponentLink2Description: http://www.ti.com/general/docs/lit/getliterature.tsp?genericPartNumber=TPS61088&&fileType=pdf&src-supplier=Avnet
footprint VQFN-20-EP(3.6x4.6)
pins: 1 VCC, 2 EN, 3 FSW, 4 SW, 5 SW, 6 SW, 7 SW, 8 BOOT, 9 VIN, 10 SS, 11 NC, 12 NC, 13 MODE, 14 VOUT, 15 VOUT, 16 VOUT, 17 FB, 18 COMP, 19 ILIM, 20 AGND, 21 PGND

## TPS61178RNWR
designator U?
ICLEDDRVRDCREG13QFN; Manufacturer: Texas Instruments; Manufacturer Part Number: TPS61178RNWR; Item Type: IC; Supplier: Mouser; LCSC Part Number: C127918; RoHS: Yes; Stock: 3098; Pricing: 1=3.28, 10=2.79, 50=2.79, 100=2.37, 1000=2.14, 10000=1.12 (USD); ComponentLink1URL: http://www.ti.com/general/docs/suppproductinfo.tsp?distId=10&amp;gotoUrl=http%3A%2F%2Fwww.ti.com%2Flit%2Fgpn%2Ftps61178&src-supplier=Digikey; ComponentLink1Description: http://www.ti.com/general/docs/suppproductinfo.tsp?distId=10&amp;gotoUrl=http%3A%2F%2Fwww.ti.com%2Flit%2Fgpn%2Ftps61178&src-supplier=Digikey; ComponentLink2URL: http://www.ti.com/lit/ds/symlink/tps61178.pdf?src-supplier=Digikey; ComponentLink2Description: http://www.ti.com/lit/ds/symlink/tps61178.pdf?src-supplier=Digikey
footprint VQFN-13-HR(3x3.5)
pins: 1 FREQ/SYNC, 2 AGND, 3 ILIMIT, 4 COMP, 5 FB, 6 PGND, 7 SW, 8 VOUT, 9 DISDRV, 10 VCC, 11 EN, 12 VIN, 13 BST

## TPS61232DRCR
designator U?
IC REG BOOST 5V 5A 10VSON; Manufacturer: Texas Instruments; Manufacturer Part Number: TPS61232DRCR; Supplier: Mouser; Supplier Part Number: 595-TPS61232DRCR; RoHS: Yes; Item Type: IC; Stock: 2057; Pricing: 1=2.74, 10=2.33, 50=2.33, 100=1.98, 1000=1.35, 10000=1.2 (USD); ComponentLink1URL: http://www.ti.com/lit/ds/symlink/tps61232.pdf?src-supplier=Digikey; ComponentLink1Description: http://www.ti.com/lit/ds/symlink/tps61232.pdf?src-supplier=Digikey; ComponentLink2URL: http://www.ti.com/general/docs/suppproductinfo.tsp?distId=10&amp;gotoUrl=http%3A%2F%2Fwww.ti.com%2Flit%2Fgpn%2Ftps61232&src-supplier=Digikey; ComponentLink2Description: http://www.ti.com/general/docs/suppproductinfo.tsp?distId=10&amp;gotoUrl=http%3A%2F%2Fwww.ti.com%2Flit%2Fgpn%2Ftps61232&src-supplier=Digikey
footprint 10-VSON (3x3)
pins: 1 SW, 2 SW, 3 VOUT, 4 VOUT, 5 PG, 6 SS, 7 FB, 8 HYS, 9 EN, 10 VIN, 11 GND

## TPS62133RGTR
designator U?
IC REG BUCK 5V 3A 16VQFN; Manufacturer: Texas Instruments; Manufacturer Part Number: TPS62133RGTR; Supplier: Mouser; Supplier Part Number: 595-TPS62133RGTR; RoHS: Yes; Category: Voltage Regulators - Switching; Stock: 4466; Pricing: 1=1.82, 10=1.54, 50=1.54, 100=1.31, 1000=0.881, 10000=0.784 (USD); ComponentLink1URL: https://datasheet.ciiva.com/2026/tps62131-2026576.pdf?src-supplier=Digi-Key; ComponentLink1Description: https://datasheet.ciiva.com/2026/tps62131-2026576.pdf?src-supplier=Digi-Key; ComponentLink2URL: https://datasheet.ciiva.com/2035/tps62130-2035262.pdf?src-supplier=Digi-Key; ComponentLink2Description: https://datasheet.ciiva.com/2035/tps62130-2035262.pdf?src-supplier=Digi-Key; ComponentLink3URL: https://datasheet.ciiva.com/2035/tps62130-2035263.pdf?src-supplier=Digi-Key; ComponentLink3Description: https://datasheet.ciiva.com/2035/tps62130-2035263.pdf?src-supplier=Digi-Key; Item Type: IC
footprint 16-QFN (3x3).
pins: 1 SW, 2 SW-1, 3 SW-2, 4 PG, 5 FB, 6 AGND, 7 FSW, 8 DEF, 9 SS/TR, 10 AVIN, 11 PVIN, 12 PVIN-1, 13 EN, 14 VOS, 15 PGND, 16 PGND-1

## TPS62162DSGR
designator U?
Buck Switching Regulator IC Positive Fixed 3.3V 1 Output 1A 8-WFDFN Exposed Pad; Manufacturer: Texas Instruments; Manufacturer Part Number: TPS62162DSGR; Number of Outputs: 1; Max Input Voltage: 17V; Min Input Voltage: 3V; Switching Frequency: 2.25MHz; Synchronous Rectifier: Yes; Quiescent Current: 17uA; Supplier 1: Mouser; RoHS: Yes; Category: Voltage Regulators - Switching; Pricing 1: 1=1.59000, 10=1.44000, 25=1.36000, 50=1.36000, 100=1.16000, 250=1.09000, 500=0.94700, 1000=0.78500, 10000=0.78400 (USD); Case/Package: SOIC; Number of Pins: 8; Contact Plating: Gold; Min Operating Temperature: -40°C; Max Operating Temperature: 125°C; Output Voltage: 3.3V; Packaging: Tape and Reel; Output Current: 1A; Package Quantity: 3000; Max Output Current: 1A; Min Output Voltage: 3.3V; Max Output Voltage: 3.3V; Operating Supply Voltage: 17V; Output Type: Fixed; Output Configuration: Positive; Series: DCS-Control™; Radiation Hardening: No; Lead Free: Lead Free; RoHS Compliant: Yes; ComponentLink1URL: https://datasheet.ciiva.com/2034/tps62161-2034675.pdf?src-supplier=Digi-Key; ComponentLink1Description: https://datasheet.ciiva.com/2034/tps62161-2034675.pdf?src-supplier=Digi-Key; Supplier Part Number 1: 595-TPS62162DSGR; LCSC Part Number: C40256; Item Type: IC
footprint 8-WSON(2x2) (IC REG BUCK 3.3V 1A 8WSON)
pins: 1 PGND, 2 VIN, 3 EN, 4 AGND, 5 FB, 6 VOS, 7 SW, 8 PG, 9 AGND

## TPS62933DRLR
designator U?
IC REG BUCK ADJ 3A SOT583; Manufacturer: Texas Instruments; Manufacturer Part Number: TPS62933DRLR; Supplier: Mouser; Supplier Part Number: 595-TPS62933DRLR; RoHS: No; Category: Voltage Regulators - Switching; Stock: 5259; Pricing: 1=0.7, 10=0.581, 50=0.581, 100=0.44, 1000=0.297, 10000=0.241 (USD); LCSC Part Number: C3200405; Item Type: IC
footprint SOT-583
pins: 1 RT, 2 EN, 3 VIN, 4 GND, 5 SW, 6 BST, 7 SS, 8 FB

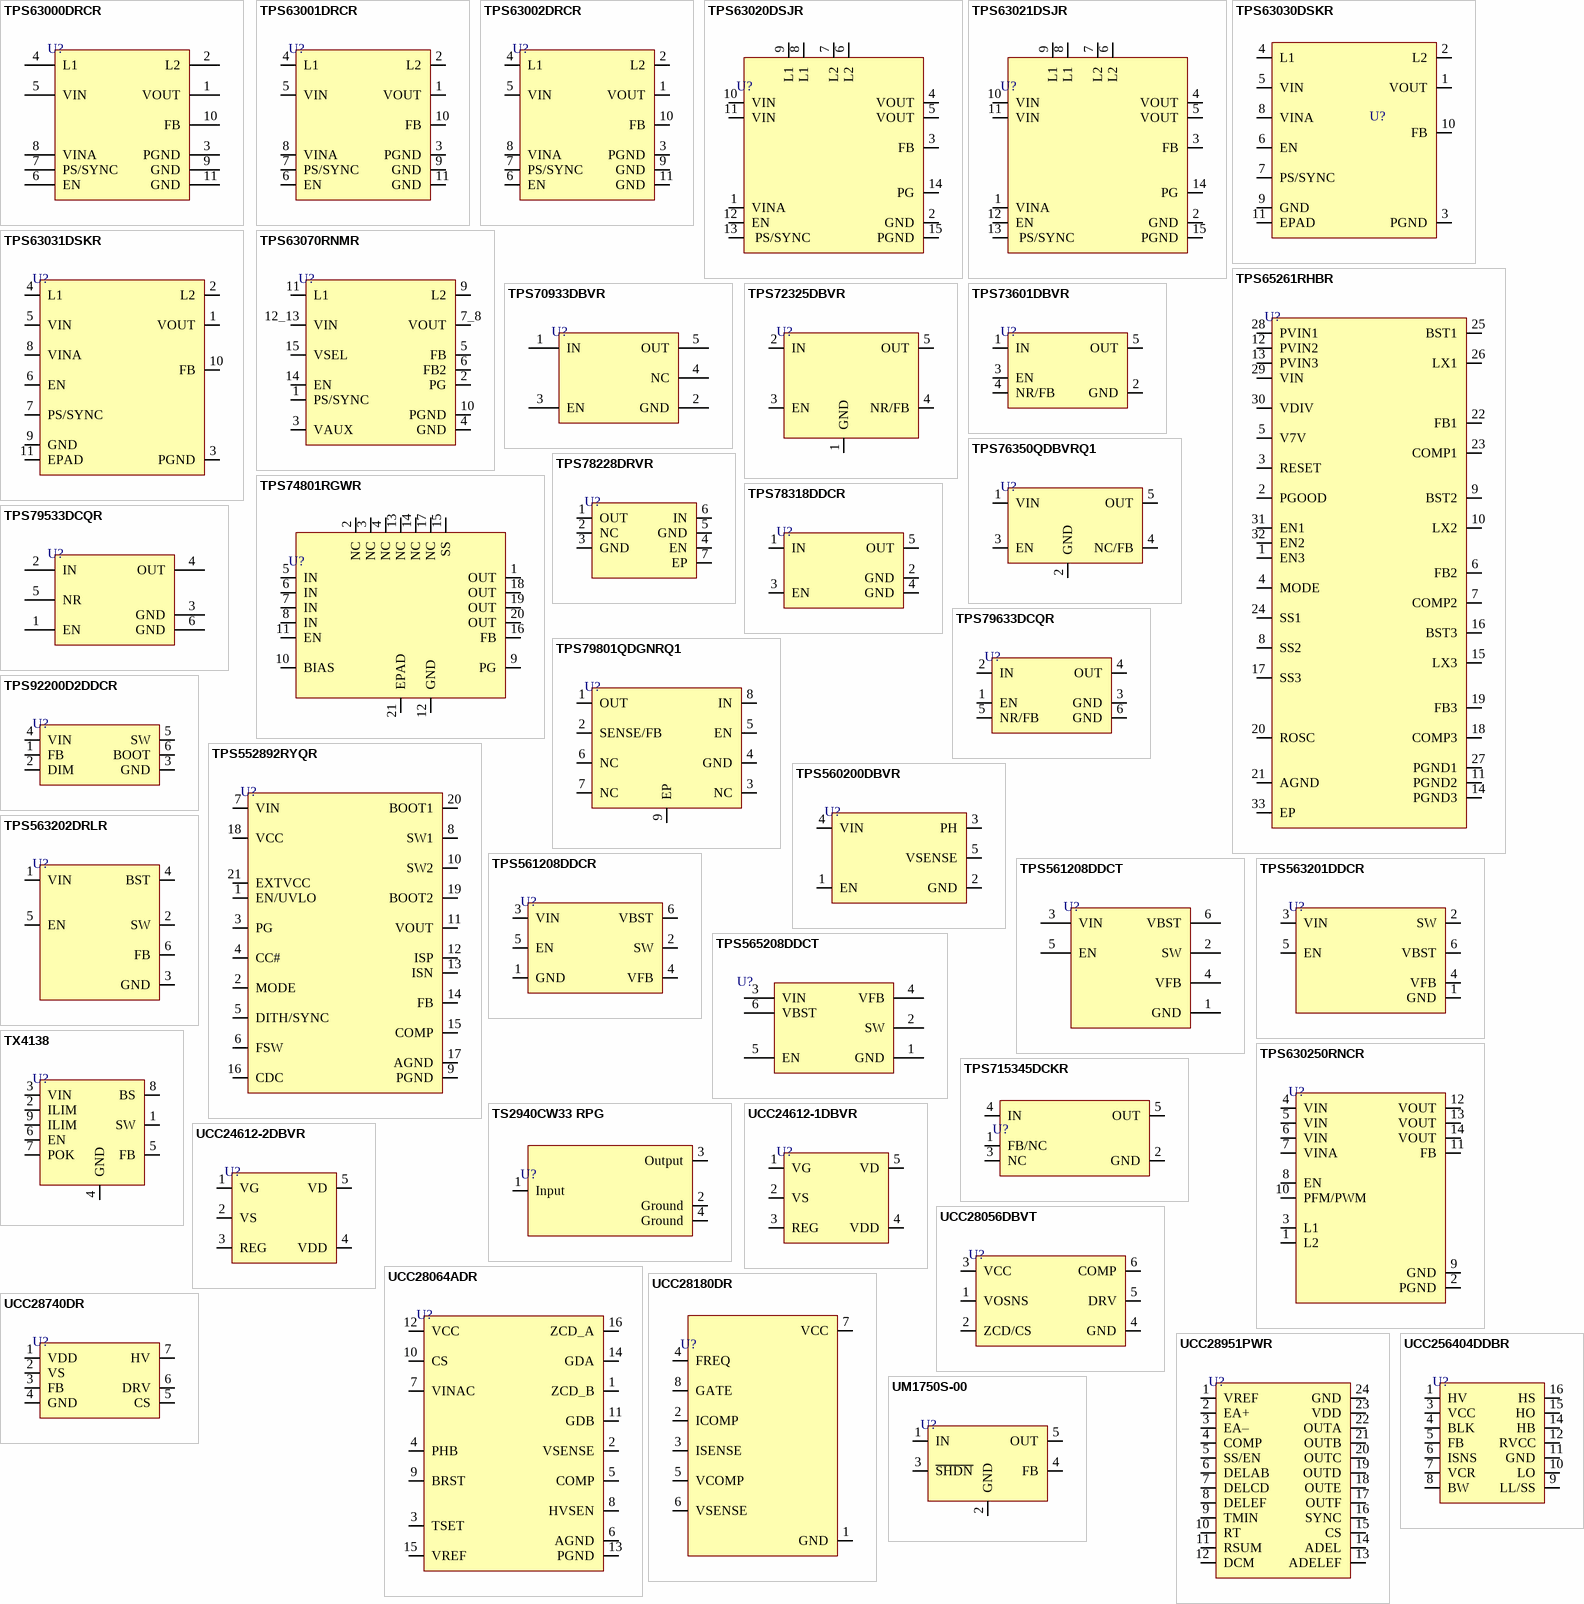
[diagram p5: symbols TPS63000DRCR to UM1750S-00]

## TPS63000DRCR
designator U?
IC REG BCK BST ADJ 1.6A 10VSON; Manufacturer: Texas Instruments; Manufacturer Part Number: TPS63000DRCR; Output Voltage: 5.5V; Output Current: 1.2A; Efficiency: 96%; Number of Outputs: 1; Switching Frequency: 1.5MHz; Min Input Voltage: 1.8V; Synchronous Rectifier: Yes; Min Output Voltage: 1.2V; Quiescent Current: 40uA; Topology: Buck-Boost; Output Type: Adjustable; Supplier 1: Digi-Key; RoHS: Yes; Category: Voltage Regulators - Switching; Pricing 1: 1=2.68000, 10=2.40500, 25=2.26840, 100=1.93270, 250=1.81472, 500=1.58788, 1000=1.31567 (USD); Case/Package: VSON; Pins: 10; Weight: 0.000921oz; Min Operating Temperature: -40°C; Max Operating Temperature: 85°C; Packaging: Tape and Reel; Package Quantity: 1; Max Output current: 1.2A; Max Supply Voltage: 5.5V; Max Output Voltage: 5.5V; Series: -; Operating Supply Voltage: 5.5V; Radiation Hardening: No; Reach SVHC Compliant: Yes; Lead Free: Lead Free; RoHS Compliant: Yes; ComponentLink1URL: https://datasheet.ciiva.com/2025/tps63001-2025809.pdf?src-supplier=Digi-Key; ComponentLink1Description: https://datasheet.ciiva.com/2025/tps63001-2025809.pdf?src-supplier=Digi-Key; ComponentLink2URL: https://datasheet.ciiva.com/27052/1525749-27052325.pdf?src-supplier=Jameco; ComponentLink2Description: https://datasheet.ciiva.com/27052/1525749-27052325.pdf?src-supplier=Jameco; ComponentLink3URL: https://datasheet.ciiva.com/41462/001014937-da-01-en-ic-reg-buck-boo-tps63000drcr-vson-10-tid-41462784.pdf?src-supplier=Conrad; ComponentLink3Description: https://datasheet.ciiva.com/41462/001014937-da-01-en-ic-reg-buck-boo-tps63000drcr-vson-10-tid-41462784.pdf?src-supplier=Conrad; ComponentLink4URL: https://datasheet.ciiva.com/2025/tps63001-2025810.pdf?src-supplier=Digi-Key; ComponentLink4Description: https://datasheet.ciiva.com/2025/tps63001-2025810.pdf?src-supplier=Digi-Key; ComponentLink5URL: https://datasheet.ciiva.com/2025/tps63001-2025811.pdf?src-supplier=Digi-Key; ComponentLink5Description: https://datasheet.ciiva.com/2025/tps63001-2025811.pdf?src-supplier=Digi-Key; Supplier Part Number 1: 296-19641-6-ND; LCSC Part Number: C24966; Item Type: IC
footprint 10-VSON (3x3)
pins: 1 VOUT, 2 L2, 3 PGND, 4 L1, 5 VIN, 6 EN, 7 PS/SYNC, 8 VINA, 9 GND, 10 FB, 11 GND

## TPS63001DRCR
designator U?
IC REG BUCK BST 3.3V 1.6A 10VSON; Manufacturer: Texas Instruments; Manufacturer Part Number: TPS63001DRCR; Switching Frequency: 1.5MHz; Efficiency: 96%; Number of Outputs: 1; Output Current: 1.2A; Max Supply Voltage: 5.5V; Min Input Voltage: 1.8V; Synchronous Rectifier: Yes; Quiescent Current: 30uA; Topology: Buck-Boost; Output Type: Fixed; Max Duty Cycle: 100%; Number of Channels: 1NUMBER; Supplier: Mouser; LCSC Part Number: C28060; RoHS: Yes; Item Type: IC; Stock: 5773; Pricing: 1=2.03, 10=1.53, 50=1.41, 100=1.27, 1000=1.14, 10000=1.02 (USD); Case/Package: VSON; Pins: 10; Weight: 0.000921oz; Min Operating Temperature: -40°C; Max Operating Temperature: 85°C; Packaging: Tape and Reel; Output Voltage: 3.3V; Package Quantity: 1; Max Output current: 1.2A; Max Output Voltage: 3.3V; Min Output Voltage: 3.3V; Operating Supply Voltage: 5.5V; Series: -; Nominal Output Voltage: 3.3V; Length: 3mm; Width: 3mm; Height: 1mm; Thickness: 900um; Radiation Hardening: No; Lead Free: Lead Free; RoHS Compliant: Yes; Reach SVHC Compliant: No; ComponentLink1URL: https://datasheet.ciiva.com/2025/tps63001-2025809.pdf?src-supplier=Digikey; ComponentLink1Description: https://datasheet.ciiva.com/2025/tps63001-2025809.pdf?src-supplier=Digikey; ComponentLink2URL: https://datasheet.ciiva.com/3220/slvs520b-3220364.pdf?src-supplier=Avnet; ComponentLink2Description: https://datasheet.ciiva.com/3220/slvs520b-3220364.pdf?src-supplier=Avnet; ComponentLink3URL: https://datasheet.ciiva.com/15113/getdatasheetpartid-188339-15113751.pdf?src-supplier=Verical; ComponentLink3Description: https://datasheet.ciiva.com/15113/getdatasheetpartid-188339-15113751.pdf?src-supplier=Verical; ComponentLink4URL: https://datasheet.ciiva.com/41462/001014938-da-01-en-ic-reg-buck-bst-tps63001drcr-vson-10-tid-41462783.pdf?src-supplier=Conrad; ComponentLink4Description: https://datasheet.ciiva.com/41462/001014938-da-01-en-ic-reg-buck-bst-tps63001drcr-vson-10-tid-41462783.pdf?src-supplier=Conrad; ComponentLink5URL: https://datasheet.ciiva.com/7994/1831174-7994044.pdf?src-supplier=Element14; ComponentLink5Description: https://datasheet.ciiva.com/7994/1831174-7994044.pdf?src-supplier=Element14; ComponentLink6URL: https://datasheet.ciiva.com/46394/1854797-46394566.pdf?src-supplier=Element14; ComponentLink6Description: https://datasheet.ciiva.com/46394/1854797-46394566.pdf?src-supplier=Element14; ComponentLink7URL: https://datasheet.ciiva.com/2025/tps63001-2025813.pdf?src-supplier=Digikey; ComponentLink7Description: https://datasheet.ciiva.com/2025/tps63001-2025813.pdf?src-supplier=Digikey; ComponentLink8URL: https://datasheet.ciiva.com/2025/tps63001-2025812.pdf?src-supplier=Digikey; ComponentLink8Description: https://datasheet.ciiva.com/2025/tps63001-2025812.pdf?src-supplier=Digikey
footprint 10-VSON (3x3)
pins: 1 VOUT, 2 L2, 3 PGND, 4 L1, 5 VIN, 6 EN, 7 PS/SYNC, 8 VINA, 9 GND, 10 FB, 11 GND

## TPS63002DRCR
designator U?
IC REG BUCK-BOOST 5V 1.6A 10VSON; Manufacturer: Texas Instruments; Manufacturer Part Number: TPS63002DRCR; Number of Outputs: 1; Efficiency: 96%; Switching Frequency: 1.5MHz; Max Output current: 1.2A; Max Supply Voltage: 5.5V; Min Input Voltage: 1.8V; Synchronous Rectifier: Yes; Quiescent Current: 30uA; Output Type: Fixed; Output Configuration: Positive; Supplier: Mouser; LCSC Part Number: C116655; RoHS: Yes; Item Type: IC; Stock: 1610; Pricing: 1=2.5, 10=2.16, 50=2.16, 100=1.81, 1000=1.23, 10000=1.07 (USD); Case/Package: VSON; Pins: 10; Weight: 0.000921oz; Min Operating Temperature: -40°C; Max Operating Temperature: 85°C; Output Voltage: 5V; Operating Supply Voltage: 5.5V; Output Current: 1.2A; Packaging: Tape and Reel; Package Quantity: 3000; Nominal Output Voltage: 5V; Max Output Voltage: 5V; Min Output Voltage: 5V; Topology: Buck-Boost; Series: -; Reach SVHC Compliant: No; Lead Free: Lead Free; RoHS Compliant: Yes; ComponentLink1URL: https://datasheet.ciiva.com/22684/1831174-22684659.pdf?src-supplier=Element14; ComponentLink1Description: https://datasheet.ciiva.com/22684/1831174-22684659.pdf?src-supplier=Element14; ComponentLink2URL: https://datasheet.ciiva.com/2025/tps63001-2025822.pdf?src-supplier=Digikey; ComponentLink2Description: https://datasheet.ciiva.com/2025/tps63001-2025822.pdf?src-supplier=Digikey; ComponentLink3URL: https://datasheet.ciiva.com/2025/tps63001-2025821.pdf?src-supplier=Digikey; ComponentLink3Description: https://datasheet.ciiva.com/2025/tps63001-2025821.pdf?src-supplier=Digikey; ComponentLink4URL: https://datasheet.ciiva.com/2025/tps63001-2025823.pdf?src-supplier=Digikey; ComponentLink4Description: https://datasheet.ciiva.com/2025/tps63001-2025823.pdf?src-supplier=Digikey; ComponentLink5URL: https://datasheet.ciiva.com/14303/tps63001-14303726.pdf?src-supplier=Avnet; ComponentLink5Description: https://datasheet.ciiva.com/14303/tps63001-14303726.pdf?src-supplier=Avnet
footprint 10-VSON (3x3)
pins: 1 VOUT, 2 L2, 3 PGND, 4 L1, 5 VIN, 6 EN, 7 PS/SYNC, 8 VINA, 9 GND, 10 FB, 11 GND

## TPS63020DSJR
designator U?
IC REG BUCK-BST ADJ 3.5A 14VSON; Manufacturer: Texas Instruments; Manufacturer Part Number: TPS63020DSJR; Min Supply Voltage: 1.8V; Number of Outputs: 1; Output Voltage: 5.5V; Output Current: 3A; Efficiency: 96%; Switching Frequency: 2.4MHz; Min Output Voltage: 1.2V; Synchronous Rectifier: Yes; Quiescent Current: 50uA; Topology: Buck-Boost; Output Type: Adjustable; Output Configuration: Positive; Supplier: Mouser; Supplier Part Number: 595-TPS63020DSJR; RoHS: Yes; Category: Voltage Regulators - Switching; Stock: 18181; Pricing: 1=2.8, 10=2.43, 50=2.43, 100=2.07, 1000=1.46, 10000=1.36 (USD); Mounting Technology: Surface Mount; Case/Package: VSON; Pins: 14; Min Operating Temperature: -40°C; Max Operating Temperature: 85°C; Package Quantity: 3000; Packaging: Tape and Reel; Min Input Voltage: 1.8V; Max Output current: 3A; Max Supply Voltage: 5.5V; Max Output Voltage: 5.5V; Operating Supply Voltage: 5.5V; Series: -; Supply Current: 50uA; Reach SVHC Compliant: No; Lead Free: Lead Free; RoHS Compliant: Yes; ComponentLink1URL: https://datasheet.ciiva.com/29733/tps63021-29733058.pdf?src-supplier=Digi-Key; ComponentLink1Description: https://datasheet.ciiva.com/29733/tps63021-29733058.pdf?src-supplier=Digi-Key; ComponentLink2URL: https://datasheet.ciiva.com/29733/tps63020-29733142.pdf?src-supplier=Digi-Key; ComponentLink2Description: https://datasheet.ciiva.com/29733/tps63020-29733142.pdf?src-supplier=Digi-Key; ComponentLink3URL: https://datasheet.ciiva.com/3221/tps63020-3221509.pdf?src-supplier=Avnet; ComponentLink3Description: https://datasheet.ciiva.com/3221/tps63020-3221509.pdf?src-supplier=Avnet; LCSC Part Number: C15483; Item Type: IC
footprint 14-VSON (4x3)
pins: 1 VINA, 2 GND, 3 FB, 4 VOUT, 5 VOUT, 6 L2, 7 L2, 8 L1, 9 L1, 10 VIN, 11 VIN, 12 EN, 13  PS/SYNC, 14 PG, 15 PGND

## TPS63021DSJR
designator U?
IC REG BUCK BST 3.3V 3.5A 14VSON; Manufacturer: Texas Instruments; Manufacturer Part Number: TPS63021DSJR; Efficiency: 96%; Number of Outputs: 1; Max Output current: 3A; Min Input Voltage: 1.8V; Max Supply Voltage: 5.5V; Switching Frequency: 2.4MHz; Synchronous Rectifier: Yes; Quiescent Current: 50uA; Output Type: Fixed; Supplier: Mouser; LCSC Part Number: C202140; RoHS: Yes; Item Type: IC; Stock: 4678; Pricing: 1=2.63, 10=1.96, 50=1.8, 100=1.61, 1000=1.43, 10000=1.35 (USD); Mounting Technology: Surface Mount; Case/Package: VSON; Pins: 14; Min Operating Temperature: -40°C; Max Operating Temperature: 85°C; Package Quantity: 1; Packaging: Cut Tape; Output Voltage: 3.3V; Output Current: 3A; Operating Supply Voltage: 5.5V; Series: -; Reach SVHC Compliant: No; Lead Free: Lead Free; RoHS Compliant: Yes; ComponentLink1URL: https://datasheet.ciiva.com/2026/tps63021-2026362.pdf?src-supplier=Digikey; ComponentLink1Description: https://datasheet.ciiva.com/2026/tps63021-2026362.pdf?src-supplier=Digikey; ComponentLink2URL: https://datasheet.ciiva.com/2026/tps63021-2026361.pdf?src-supplier=Digikey; ComponentLink2Description: https://datasheet.ciiva.com/2026/tps63021-2026361.pdf?src-supplier=Digikey; ComponentLink3URL: https://datasheet.ciiva.com/2026/tps63021-2026363.pdf?src-supplier=Digikey; ComponentLink3Description: https://datasheet.ciiva.com/2026/tps63021-2026363.pdf?src-supplier=Digikey; ComponentLink4URL: https://datasheet.ciiva.com/3221/tps63020-3221510.pdf?src-supplier=Avnet; ComponentLink4Description: https://datasheet.ciiva.com/3221/tps63020-3221510.pdf?src-supplier=Avnet
footprint 14-VSON (4x3)
pins: 1 VINA, 2 GND, 3 FB, 4 VOUT, 5 VOUT, 6 L2, 7 L2, 8 L1, 9 L1, 10 VIN, 11 VIN, 12 EN, 13  PS/SYNC, 14 PG, 15 PGND